# Altium schematic symbol library STPMIC25APQR.SchLib: 1 symbol
Pins are listed as number, name and electrical type; pins without a type are passive.

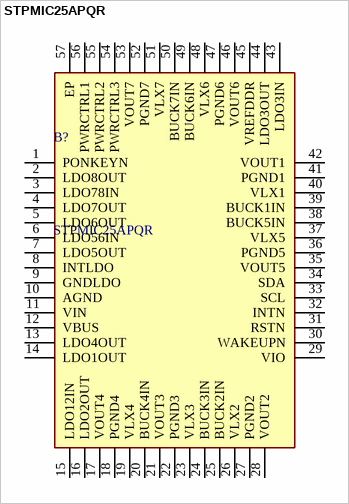
[diagram p0: symbol STPMIC25APQR]

## STPMIC25APQR
designator B?
Highly integrated power management IC for micro processor units; Manufacturer_Name: STMicroelectronics; Geometry.Height: 0.9mm; Manufacturer_Part_Number: STPMIC25APQR; Mouser Part Number: 511-STPMIC25APQR; Mouser Price/Stock: https://www.mouser.co.uk/ProductDetail/STMicroelectronics/STPMIC25APQR?qs=jRuttqqUwMR8b%2FyHW8MhFQ%3D%3D; Arrow Part Number: STPMIC25APQR; Arrow Price/Stock: https://www.arrow.com/en/products/stpmic25apqr/stmicroelectronics?utm_currency=USD&region=nac; Datasheet Link: https://www.st.com/resource/en/datasheet/stpmic25.pdf
footprint QFN40P650X650X90-57N-D
pins: 1 PONKEYN, 2 LDO8OUT, 3 LDO78IN, 4 LDO7OUT, 5 LDO6OUT, 6 LDO56IN, 7 LDO5OUT, 8 INTLDO, 9 GNDLDO, 10 AGND, 11 VIN, 12 VBUS, 13 LDO4OUT, 14 LDO1OUT, 15 LDO12IN, 16 LDO2OUT, 17 VOUT4, 18 PGND4, 19 VLX4, 20 BUCK4IN, 21 VOUT3, 22 PGND3, 23 VLX3, 24 BUCK3IN, 25 BUCK2IN, 26 VLX2, 27 PGND2, 28 VOUT2, 29 VIO, 30 WAKEUPN, 31 RSTN, 32 INTN, 33 SCL, 34 SDA, 35 VOUT5, 36 PGND5, 37 VLX5, 38 BUCK5IN, 39 BUCK1IN, 40 VLX1, 41 PGND1, 42 VOUT1, 43 LDO3IN, 44 LDO3OUT, 45 VREFDDR, 46 VOUT6, 47 PGND6, 48 VLX6, 49 BUCK6IN, 50 BUCK7IN, 51 VLX7, 52 PGND7, 53 VOUT7, 54 PWRCTRL3, 55 PWRCTRL2, 56 PWRCTRL1, 57 EP